# Altium footprint library 47µF_63V、低ESR铝电解_插件,D8xL11.5mm.PcbLib: 1 footprints
Each footprint in its own frame and in the unit in brackets; x right, y up, seen from the top. Pads: shape width x height; smd on the part's side, far side on the other; paste and mask are expansions set on the pad; w line width, h text height; cw(c..) or ccw(c..) is an arc to the next point about the centre after c.
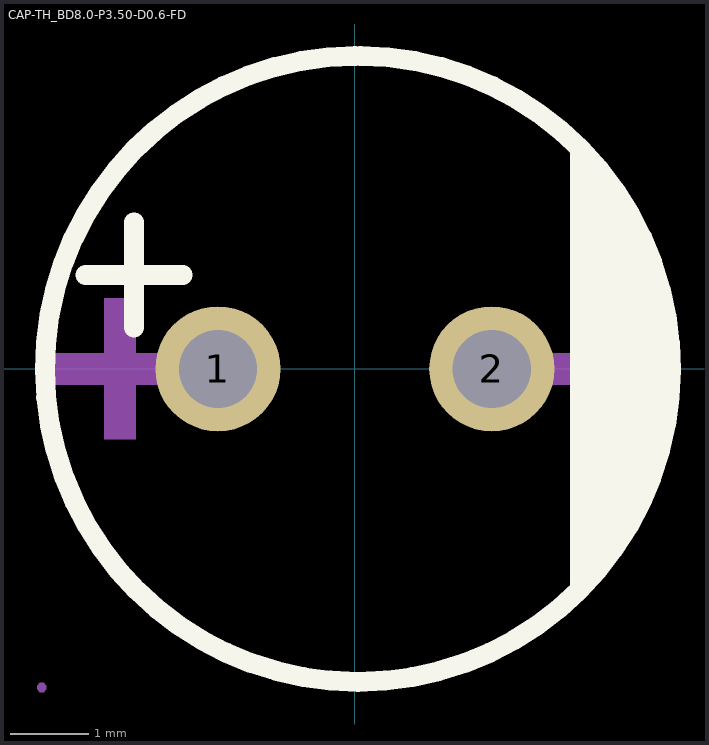
[diagram p0: the footprint, top view; thin cyan lines are the x and y axes]

## CAP-TH_BD8.0-P3.50-D0.6-FD [mm]
pads (2):
  round 1.6 hole 1: 1(-1.75,0) 2(1.75,0)
Top Overlay:
  region: 2.75,-3 2.941,-2.785 3.118,-2.558 3.28,-2.32 3.425,-2.071 3.554,-1.814 3.665,-1.549 3.759,-1.276 3.834,-0.999 3.891,-0.716 3.929,-0.431 3.948,-0.144 3.948,0.144 3.929,0.431 3.891,0.716 3.834,0.999 3.759,1.276 3.665,1.549 3.554,1.814 3.425,2.071 3.28,2.32 3.118,2.558 2.941,2.785 2.75,3 2.75,-3
  lines w0.254: -3.445,1.2 -2.2,1.2 ; -2.822,0.527 -2.822,1.873 ; 0.003,4 ccw(c0.038,0.001) 0.074,4
Mechanical 2:
  region: -3.2,0.5 -3.2,-0.9 -2.8,-0.9 -2.8,0.7 -2.8,0.9 -3.2,0.9
  region: -2.5,0.2 -3.9,0.2 -3.9,-0.2 -2.3,-0.2 -2.1,-0.2 -2.1,0.2
  region: 3.5,0.2 2.1,0.2 2.1,-0.2 3.7,-0.2 3.9,-0.2 3.9,0.2
Mechanical 6:
  lines w0.051: -0.003,-4.072 cw(c-0.001,-0.072) 0,-4.072 -0.003,-4.072
Mechanical 8:
  region: -3.941,-4.072 -3.941,-4.096 -3.976,-4.132 -4.026,-4.132 -4.061,-4.096 -4.061,-4.072 -4.061,-4.047 -4.026,-4.012 -3.976,-4.012 -3.941,-4.047 -3.941,-4.072
Mechanical 9:
  region: -1.45,0 -1.45,-0.06 -1.496,-0.17 -1.58,-0.254 -1.69,-0.3 -1.81,-0.3 -1.92,-0.254 -2.004,-0.17 -2.05,-0.06 -2.05,0 -2.05,0.06 -2.004,0.17 -1.92,0.254 -1.81,0.3 -1.69,0.3 -1.58,0.254 -1.496,0.17 -1.45,0.06 -1.45,0
  region: 2.05,0 2.05,-0.06 2.004,-0.17 1.92,-0.254 1.81,-0.3 1.69,-0.3 1.58,-0.254 1.496,-0.17 1.45,-0.06 1.45,0 1.45,0.06 1.496,0.17 1.58,0.254 1.69,0.3 1.81,0.3 1.92,0.254 2.004,0.17 2.05,0.06 2.05,0